# Altium footprint library Robert_.PcbLib: 95 footprints (part 3 of 6)
Each footprint in its own frame and in the unit in brackets; x right, y up, seen from the top. Pads: shape width x height; smd on the part's side, far side on the other; paste and mask are expansions set on the pad; w line width, h text height; cw(c..) or ccw(c..) is an arc to the next point about the centre after c.
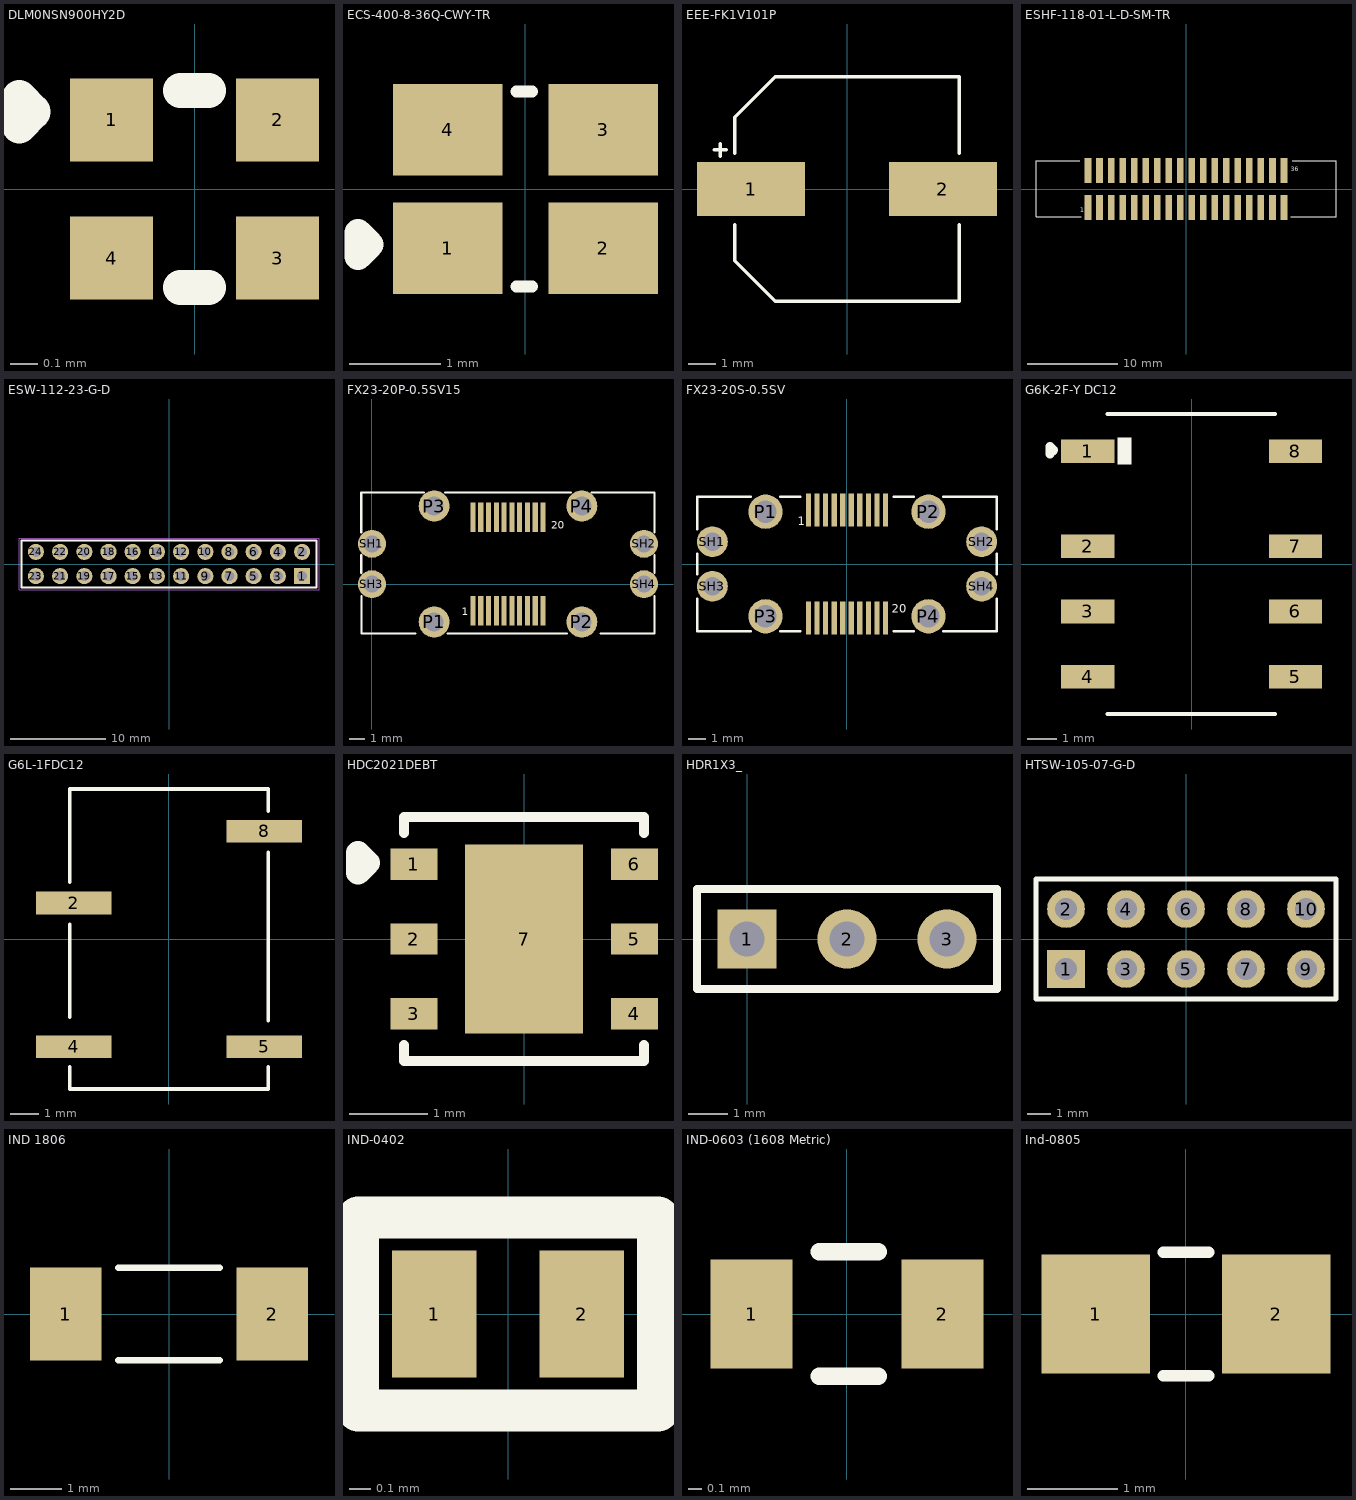
[diagram p2: the footprints below, top view; thin cyan lines are the x and y axes]

## DLM0NSN900HY2D [mm]
pads (4):
  rect 0.3x0.3 smd mask+0.055: 1(-0.3,0.25) 2(0.3,0.25) 3(0.3,-0.25) 4(-0.3,-0.25)
Top Overlay:
  lines w0.127: -0.051,-0.356 0.051,-0.356 ; -0.051,0.356 0.051,0.356 ; -0.635,0.229 -0.635,0.33 -0.584,0.279 -0.635,0.229
3D body "DLM0NSN900HY2D--3DModel-STEP-1.STEP": height 0.5, standoff 0, extent -0.425,-0.325 0.425,0.325

## ECS-400-8-36Q-CWY-TR [mm]
pads (4):
  rect 1.2x1 smd: 1(-0.85,-0.65) 2(0.85,-0.65) 3(0.85,0.65) 4(-0.85,0.65)
Top Overlay:
  lines w0.127: -0.102,-1.067 0.076,-1.067 ; -0.102,1.067 0.076,1.067
  lines w0.3: -1.832,-0.734 -1.705,-0.607 -1.832,-0.48 -1.832,-0.734
3D body "User Library-SM2520-4.step": height 0.8, standoff -0.03, extent -1.25,-1 1.25,1

## EEE-FK1V101P [mm]
pads (2):
  rect 4x2 smd: 1(-3.55,0) 2(3.55,0)
Top Overlay:
  lines w0.127: -4.922,1.448 -4.464,1.448 ; -4.693,1.219 -4.693,1.676 ; -4.15,-1.32 -4.15,-2.65 -2.65,-4.15 4.15,-4.15 4.15,-1.32 ; -4.15,1.32 -4.15,2.65 -2.65,4.15 4.15,4.15 4.15,1.32
3D body "step_temp.STEP": height 10.2, standoff 0, extent -4.85,-4.15 4.85,4.15

## ESHF-118-01-L-D-SM-TR [mm]
pads (36):
  rect 0.74x2.795 smd: 1(-10.795,-2.033) 2(-10.795,2.033) 3(-9.525,-2.033) 4(-9.525,2.033) 5(-8.255,-2.033) 6(-8.255,2.033) 7(-6.985,-2.033) 8(-6.985,2.033) 9(-5.715,-2.033) 10(-5.715,2.033) 11(-4.445,-2.033) 12(-4.445,2.033) 13(-3.175,-2.033) 14(-3.175,2.033) 15(-1.905,-2.033) 16(-1.905,2.033) 17(-0.635,-2.033) 18(-0.635,2.033) 19(0.635,-2.033) 20(0.635,2.033) 21(1.905,-2.033) 22(1.905,2.033) 23(3.175,-2.033) 24(3.175,2.033) 25(4.445,-2.033) 26(4.445,2.033) 27(5.715,-2.033) 28(5.715,2.033) 29(6.985,-2.033) 30(6.985,2.033) 31(8.255,-2.033) 32(8.255,2.033) 33(9.525,-2.033) 34(9.525,2.033) 35(10.795,-2.033) 36(10.795,2.033)
Top Overlay:
  lines w0.127: -11.735,3.099 -16.535,3.099 -16.535,-3.073 -11.557,-3.073 ; 11.557,-3.073 16.535,-3.073 16.535,3.099 11.735,3.099
  text "1" at -11.656,-2.563 h0.5
  text "36" at 11.559,1.933 h0.5
3D body "ESHF-118-01-L-D-SM-TR.stp": height 5.5, standoff 0.04, extent -16.51,-3.048 16.51,3.048

## ESW-112-23-G-D [mm]
pads (24):
  rect 1.7x1.7 hole 1.04: 1(13.97,-1.27)
  round 1.7 hole 1.04: 2(13.97,1.27) 3(11.43,-1.27) 4(11.43,1.27) 5(8.89,-1.27) 6(8.89,1.27) 7(6.35,-1.27) 8(6.35,1.27) 9(3.81,-1.27) 10(3.81,1.27) 11(1.27,-1.27) 12(1.27,1.27) 13(-1.27,-1.27) 14(-1.27,1.27) 15(-3.81,-1.27) 16(-3.81,1.27) 17(-6.35,-1.27) 18(-6.35,1.27) 19(-8.89,-1.27) 20(-8.89,1.27) 21(-11.43,-1.27) 22(-11.43,1.27) 23(-13.97,-1.27) 24(-13.97,1.27)
Top Overlay:
  lines w0.2: -15.495,-2.475 -15.495,2.475 15.495,2.475 15.495,-2.475 -15.495,-2.475
Mechanical 15:
  lines w0.05: -15.745,-2.725 -15.745,2.725 15.745,2.725 15.745,-2.725 -15.745,-2.725
3D body "ESW-112-23-G-D.stp": height 13.61, standoff -4.81, extent -15.494,-2.54 15.494,2.54

## FX23-20P-0.5SV15 [mm]
pads (28):
  rect 0.33x1.905 smd: 1(6.5,-1.7) 2(7,-1.7) 3(7.5,-1.7) 4(8,-1.7) 5(8.5,-1.7) 6(9,-1.7) 7(9.5,-1.7) 8(10,-1.7) 9(10.5,-1.7) 10(11,-1.7) 11(6.5,4.3) 12(7,4.3) 13(7.5,4.3) 14(8,4.3) 15(8.5,4.3) 16(9,4.3) 17(9.5,4.3) 18(10,4.3) 19(10.5,4.3) 20(11,4.3)
  round 2 hole 1.22: P1(4,-2.425) P2(13.5,-2.425) P3(4,5.025) P4(13.5,5.025)
  round 1.8 hole 1.092: SH1(0,2.6) SH2(17.5,2.6) SH3(0,0) SH4(17.5,0)
Top Overlay:
  lines w0.152: -0.699,0.718 -0.699,1.882 ; -0.699,3.327 -0.699,5.897 3.327,5.897 ; -0.673,-0.762 -0.673,-3.17 2.793,-3.17 ; 4.725,5.897 12.775,5.897 ; 4.877,-3.175 12.548,-3.175 ; 14.147,5.897 18.173,5.897 18.173,3.327 ; 14.707,-3.17 18.173,-3.17 18.173,-0.762 ; 18.173,0.718 18.173,1.882
  text "1" at 5.768,-2.004 h0.5
  text "20" at 11.534,3.558 h0.5
3D body "FX23-20P-0.5SV15--3DModel-STEP-1.STEP": height 12.85, standoff -1.35, extent -0.612,-3.078 18.088,5.822

## FX23-20S-0.5SV [mm]
pads (28):
  rect 0.305x1.905 smd: 1(-2.25,3.15) 2(-1.75,3.15) 3(-1.25,3.15) 4(-0.75,3.15) 5(-0.25,3.15) 6(0.25,3.15) 7(0.75,3.15) 8(1.25,3.15) 9(1.75,3.15) 10(2.25,3.15) 11(-2.25,-3.15) 12(-1.75,-3.15) 13(-1.25,-3.15) 14(-0.75,-3.15) 15(-0.25,-3.15) 16(0.25,-3.15) 17(0.75,-3.15) 18(1.25,-3.15) 19(1.75,-3.15) 20(2.25,-3.15)
  round 2 hole 1.295: P1(-4.75,3.05) P2(4.75,3.05) P3(-4.75,-3.05) P4(4.75,-3.05)
  round 1.8 hole 1.092: SH1(-7.85,1.3) SH2(7.85,1.3) SH3(-7.85,-1.3) SH4(7.85,-1.3)
Top Overlay:
  lines w0.152: -8.725,-2.02 -8.725,-3.924 -5.621,-3.924 ; -8.725,-0.58 -8.725,0.58 ; -8.725,2.02 -8.725,3.924 -5.621,3.924 ; -3.879,-3.924 -2.735,-3.924 ; -3.879,3.924 -2.735,3.924 ; 2.735,-3.924 3.879,-3.924 ; 2.735,3.924 3.879,3.924 ; 5.621,-3.924 8.725,-3.924 8.725,-2.02 ; 5.621,3.924 8.725,3.924 8.725,2.02 ; 8.725,-0.58 8.725,0.58
  text "20" at 2.618,-2.843 h0.5
  text "1" at -2.868,2.263 h0.5
3D body "FX23-20S-0.5SV.STEP": height 6.8, standoff -1.35, extent -8.6,-3.8 8.6,3.8

## G6K-2F-Y DC12 [mm]
pads (8):
  rect 1.8x0.8 smd: 1(-3.5,3.8) 2(-3.5,0.6) 3(-3.5,-1.6) 4(-3.5,-3.8) 5(3.5,-3.8) 6(3.5,-1.6) 7(3.5,0.6) 8(3.5,3.8)
Top Overlay:
  rectangle: -2.489,3.353 -2.032,4.267
  lines w0.127: -2.845,-5.055 2.819,-5.055 ; -2.845,5.055 2.819,5.055
  lines w0.3: -4.778,3.711 -4.778,3.965 -4.651,3.838 -4.778,3.711
3D body "G6K_2F_Y.step": height 5.2, standoff 0, extent -3.835,-5 3.965,5

## G6L-1FDC12 [mm]
pads (4):
  rect 2.66x0.8 smd: 2(-3.37,1.27) 4(-3.37,-3.81) 5(3.37,-3.81) 8(3.37,3.81)
Top Overlay:
  lines w0.127: -3.5,-4.516 -3.5,-5.3 3.5,-5.3 3.5,-4.516 ; -3.5,-2.76 -3.5,0.528 ; -3.5,2.012 -3.5,5.3 3.5,5.3 3.5,4.516 ; 3.5,3.068 3.505,-2.896
3D body "g6l-1f.STEP": height 4.2, standoff 0, extent -4.2,-5.3 4.2,5.3

## HDC2021DEBT [mm]
pads (7):
  rect 0.6x0.4 smd: 1(-1.4,0.95) 2(-1.4,0) 3(-1.4,-0.95) 4(1.4,-0.95) 5(1.4,0) 6(1.4,0.95)
  rect 1.5x2.4 smd: 7(0,0)
Top Overlay:
  lines w0.127: -1.524,-1.346 -1.524,-1.549 1.524,-1.549 1.524,-1.346 ; -1.524,1.346 -1.524,1.549 1.524,1.549 1.524,1.346
  lines w0.3: -2.111,0.841 -2.111,1.095 -1.984,0.968 -2.111,0.841
3D body "DEB0006A.stp": height 0.87, standoff 0, extent -1.5,-1.5 1.5,1.5

## HDR1X3_ [mm] "Connector; Header; 3 Position"
pads (3):
  rect 1.5x1.5 hole 0.9: 1(0,0)
  round 1.5 hole 0.9: 2(2.54,0) 3(5.08,0)
Top Overlay:
  lines w0.2: -1.27,-1.27 -1.27,1.27 6.35,1.27 6.35,-1.27 -1.27,-1.27
3D body "User Library-Header_Male_3Pin.STEP": height 8.54, standoff -3, extent -1.27,-1.245 6.35,1.245

## HTSW-105-07-G-D [mm]
pads (10):
  rect 1.6x1.6 hole 0.95: 1(-5.08,-1.27)
  round 1.6 hole 0.95: 2(-5.08,1.27) 3(-2.54,-1.27) 4(-2.54,1.27) 5(0,-1.27) 6(0,1.27) 7(2.54,-1.27) 8(2.54,1.27) 9(5.08,-1.27) 10(5.08,1.27)
Top Overlay:
  lines w0.2: -6.35,-2.54 6.35,-2.54 6.35,0 6.35,2.54 -6.35,2.54 -6.35,0 -6.35,-2.54
3D body "HTSW-105-07-G-D.stp": height 8.38, standoff -2.54, extent -6.35,-2.515 6.35,2.515

## IND 1806 [mm]
pads (2):
  rect 1.4x1.82 smd: 1(-2.01,0) 2(2.01,0)
Top Overlay:
  lines w0.127: -0.99,-0.9 0.99,-0.9 ; -0.99,0.9 0.99,0.9
3D body "BLM41PG600SH1L.STEP": height 1.6, standoff 0, extent -2.25,-0.914 2.25,0.886

## IND-0402 [mm]
pads (2):
  rect 0.4x0.6 smd: 1(-0.35,0) 2(0.35,0)
Top Overlay:
  lines w0.2: -0.711,-0.457 -0.305,-0.457 0.711,-0.457 0.711,0.457 -0.305,0.457 -0.711,0.457 -0.711,-0.457
3D body "User Library-d0402h025.step": height 0.25, standoff 0, extent -0.5,-0.25 0.5,0.25

## IND-0603 (1608 Metric) [mm] "0.063\" L x 0.032\" W (1.60mm x 0.80mm)"
pads (2):
  rect 0.6x0.8 smd: 1(-0.7,0) 2(0.7,0)
Top Overlay:
  lines w0.127: -0.203,-0.457 0.229,-0.457 ; -0.203,0.457 0.229,0.457
3D body "742792602.stp": height 0.78, standoff -0.02, extent -0.8,-0.4 0.8,0.4

## Ind-0805 [mm] "Inductor 0805"
pads (2):
  rect 1.2x1.32 smd: 1(-1,0) 2(1,0)
Top Overlay:
  lines w0.127: -0.254,-0.686 0.254,-0.686 ; -0.254,0.686 0.254,0.686
3D body "45637.stp": height 0.47, standoff -0.03, extent -1,-0.625 1,0.625